# Altium schematic symbol library M2_KEY_M.SchLib: 23 symbols
Pins are listed as number, name and electrical type; pins without a type are passive.

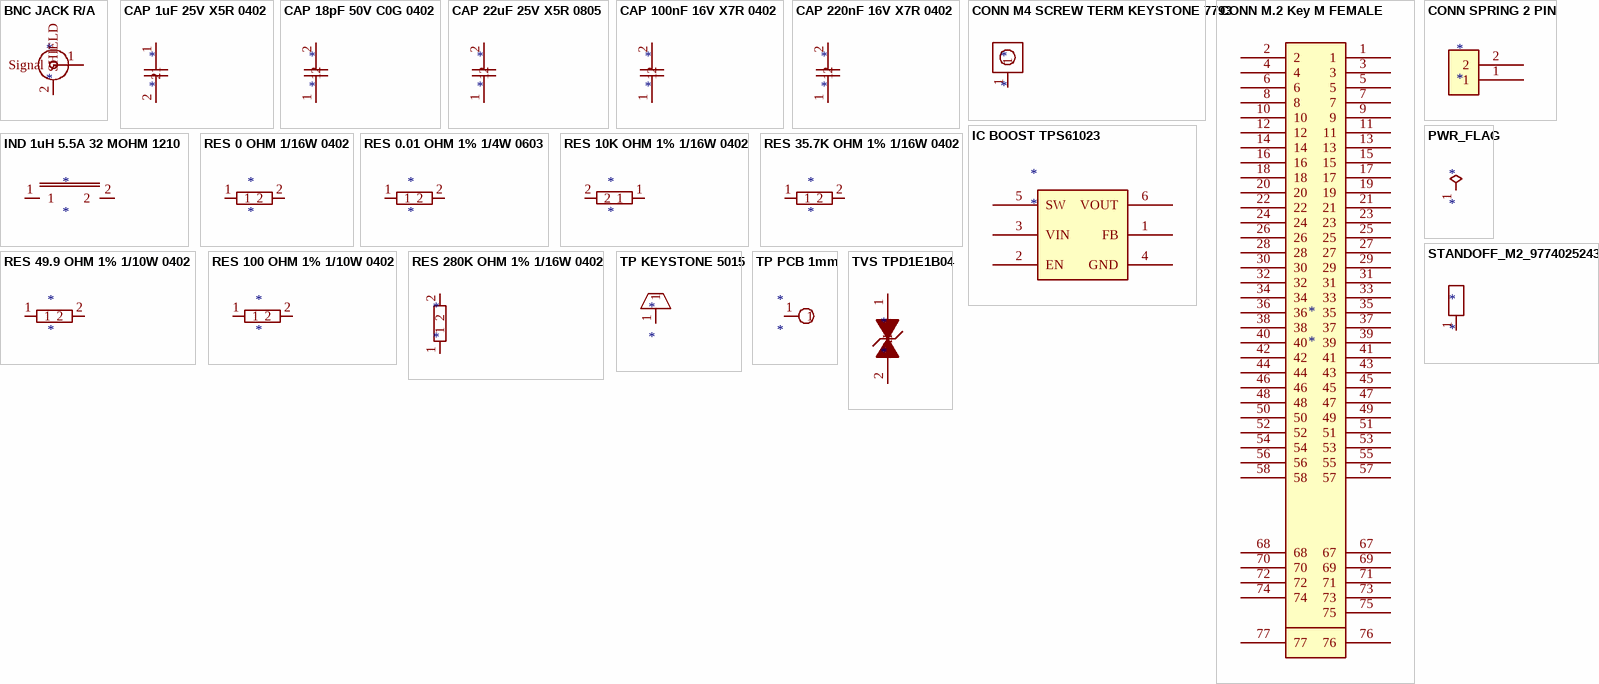
[diagram p0: symbols BNC JACK R/A to TVS TPD1E1B04]

## BNC JACK R/A
designator *
pins: 1 Signal, 2 SHIELD

## CAP 1uF 25V X5R 0402
designator *
pins: 1, 2

## CAP 18pF 50V C0G 0402
designator *
pins: 1, 2

## CAP 22uF 25V X5R 0805
designator *
pins: 1, 2

## CAP 100nF 16V X7R 0402
designator *
pins: 1, 2

## CAP 220nF 16V X7R 0402
designator *
pins: 1, 2

## CONN M4 SCREW TERM KEYSTONE 7793
designator *
pins: 1

## CONN M.2 Key M FEMALE
designator *
pins: 1, 2, 3, 4, 5, 6, 7, 8, 9, 10, 11, 12, 13, 14, 15, 16, 17, 18, 19, 20, 21, 22, 23, 24, 25, 26, 27, 28, 29, 30, 31, 32, 33, 34, 35, 36, 37, 38, 39, 40, 41, 42, 43, 44, 45, 46, 47, 48, 49, 50, 51, 52, 53, 54, 55, 56, 57, 58, 67, 68, 69, 70, 71, 72, 73, 74, 75, 76, 77

## CONN SPRING 2 PIN
designator *
pins: 1, 2

## IC BOOST TPS61023
designator *
pins: 1 FB, 2 EN, 3 VIN, 4 GND, 5 SW, 6 VOUT

## IND 1uH 5.5A 32 MOHM 1210
designator *
pins: 1, 2

## PWR_FLAG
designator *  (graphical)
pins: 1

## RES 0 OHM 1/16W 0402
designator *
pins: 1, 2

## RES 0.01 OHM 1% 1/4W 0603
designator *
pins: 1, 2

## RES 10K OHM 1% 1/16W 0402
designator *
pins: 1, 2

## RES 35.7K OHM 1% 1/16W 0402
designator *
pins: 1, 2

## RES 49.9 OHM 1% 1/10W 0402
designator *
pins: 1, 2

## RES 100 OHM 1% 1/10W 0402
designator *
pins: 1, 2

## RES 280K OHM 1% 1/16W 0402
designator *
pins: 1, 2

## STANDOFF_M2_9774025243R
designator *
pins: 1

## TP KEYSTONE 5015
designator *
pins: 1

## TP PCB 1mm
designator *
pins: 1

## TVS TPD1E1B04
designator *
pins: 1 K, 2 A